# EAGLE library part MAX17048 (library orb)
Analog/Maxim MAX17048G+T10 fuel gauge (TDFN-8)
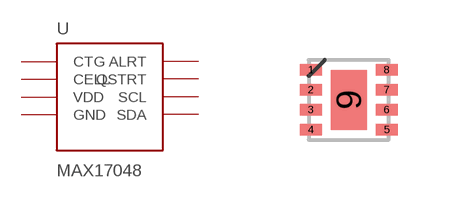
[diagram p2: symbol with the pads of TDFN8_2X2; footprint TDFN8_2X2]

Designator prefix U

## MAX17048  [TDFN8_2X2]
1  CTG  pas
2  CELL  pas
3  VDD  pas
4  GND  pas
5  ALRT  pas
6  QSTRT  pas
7  SCL  pas
8  SDA  pas
9  GND  pas

## Footprint TDFN8_2X2 (pad centres in mm)
TDFN-8 2 x 2 mm, 0.5 mm pitch, exposed pad. IPC-style pads: verify against the Analog Devices land pattern (pad 9 = EP)
smd 0.55 x 0.28: 1 -0.95,0.75; 2 -0.95,0.25; 3 -0.95,-0.25; 4 -0.95,-0.75; 5 0.95,-0.75; 6 0.95,-0.25; 7 0.95,0.25; 8 0.95,0.75
smd 0.9 x 1.5: 9 0,0